# Altium footprint library LimeMicroAltiumLib.PcbLib: 876 footprints (part 7 of 57)
Each footprint in its own frame and in the unit in brackets; x right, y up, seen from the top. Pads: shape width x height; smd on the part's side, far side on the other; paste and mask are expansions set on the pad; w line width, h text height; cw(c..) or ccw(c..) is an arc to the next point about the centre after c.
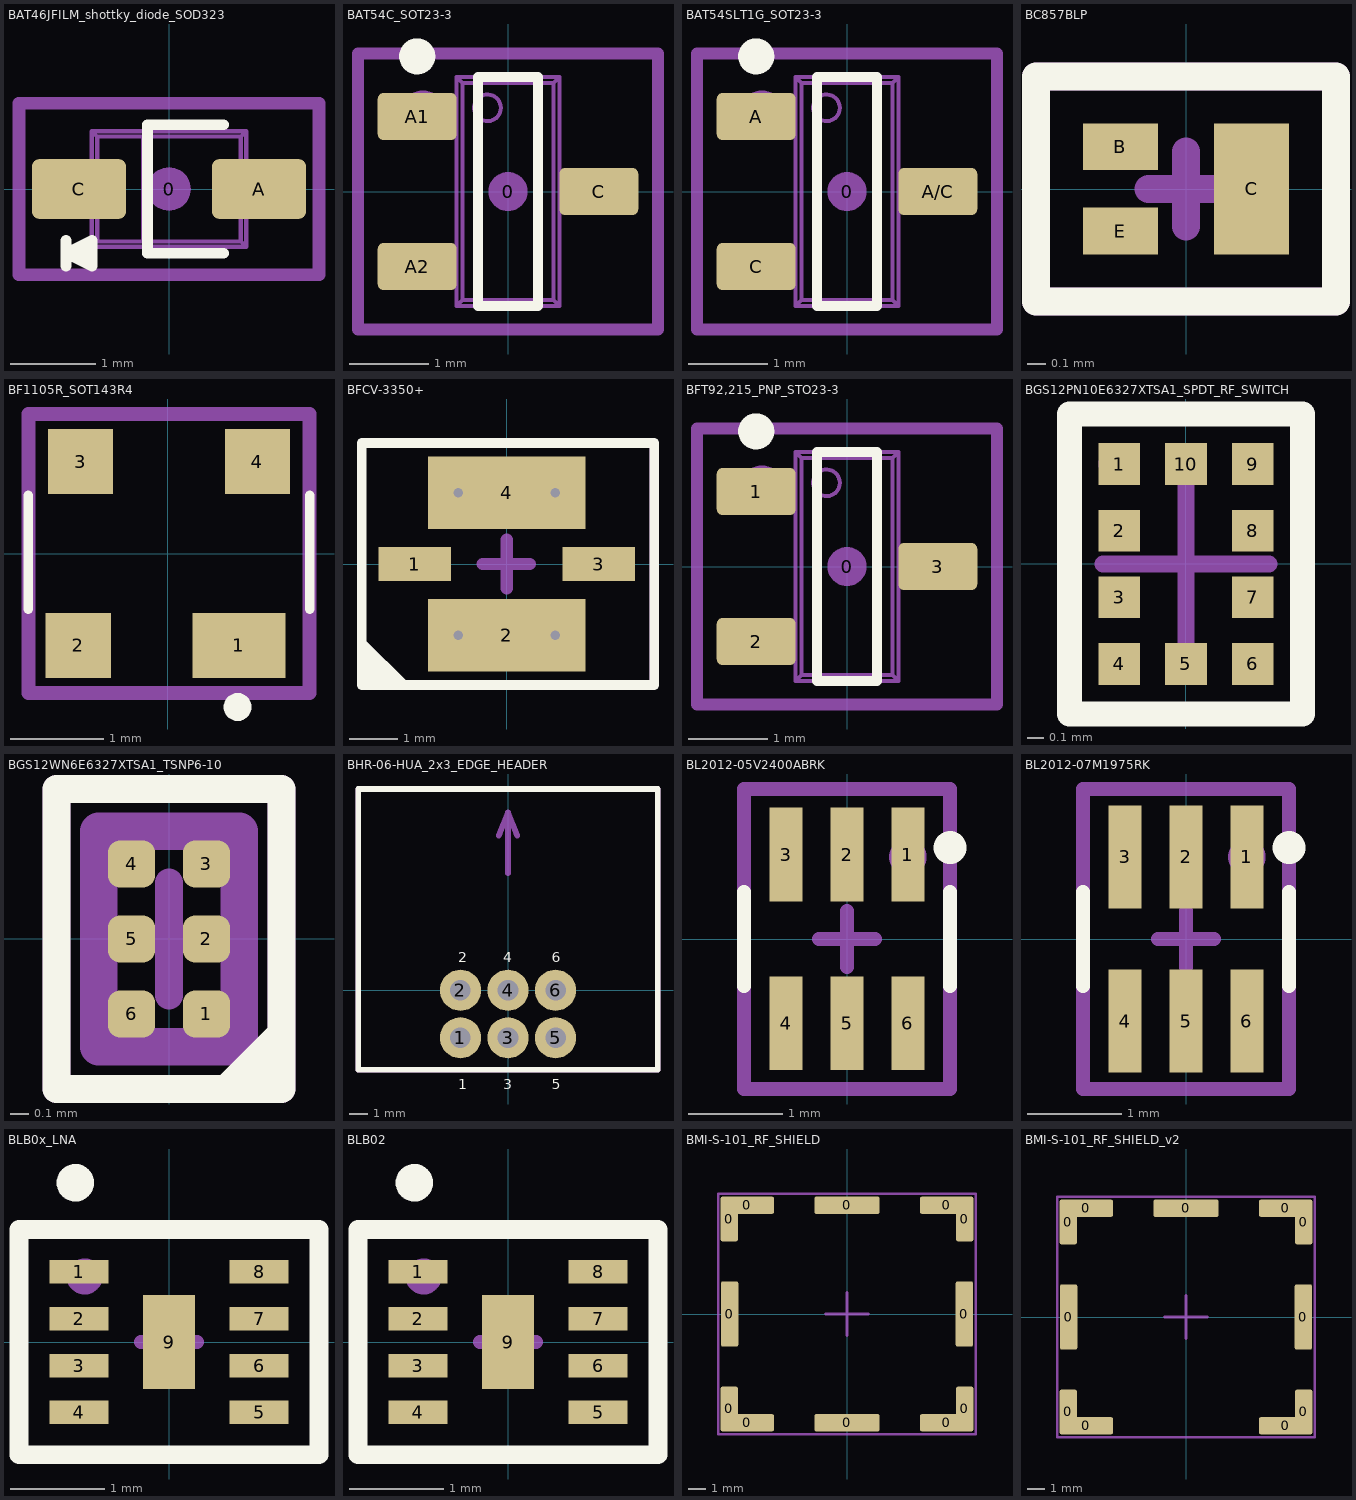
[diagram p6: the footprints below, top view; thin cyan lines are the x and y axes]

## BAT46JFILM_shottky_diode_SOD323 [mm] "SOD-323; 2 Leads; Body 1.8 x 1.35 mm, (LxW)"
height 1.15
pads (3):
  round 0.508 on Mech15: 0(0,0)
  rrect25% 1.1x0.7 smd: A(1.05,0) C(-1.05,0)
Top Overlay:
  lines w0.127: -1.2,-0.9 -1.2,-0.6 ; -0.9,-0.75 -1.2,-0.75 ; 0.635,-0.75 -0.25,-0.75 -0.25,0.75 0.635,0.75 ; -1.2,-0.75 -0.9,-0.9 -0.9,-0.6 -1.2,-0.75
Mechanical 13:
  lines w0.05: -1.157,-0.2 -1.157,0.2 ; -1.11,-0.2 -1.11,0.2 ; -0.91,-0.2 -0.91,0.2 ; -0.9,-0.2 -0.9,-0.675 ; -0.9,0.2 -0.9,0.675 ; 0.9,-0.2 0.9,-0.675 ; 0.9,0.2 0.9,0.675 ; 0.91,-0.2 0.91,0.2 ; 1.11,-0.2 1.11,0.2 ; 1.157,-0.2 1.157,0.2 ; -0.9,-0.675 -0.838,-0.613 ; -0.9,-0.675 0.9,-0.675 ; -0.9,0.675 0.9,0.675 ; -0.9,0.675 -0.838,0.613 ; -0.838,-0.613 -0.838,0.613 ; -0.838,-0.613 -0.3,-0.613 ; -0.838,0.613 -0.3,0.613 ; -0.3,-0.613 -0.3,0.613 ; -0.3,-0.613 0.838,-0.613 ; -0.3,0.613 0.838,0.613 ; 0.838,-0.613 0.838,0.613 ; 0.838,-0.613 0.9,-0.675 ; 0.838,0.613 0.9,0.675 ; -1.3,-0.2 -1.3,0.2 -0.879,0.2 -0.879,-0.2 -1.3,-0.2 ; 0.879,-0.2 1.3,-0.2 1.3,0.2 0.879,0.2 0.879,-0.2
Mechanical 15:
  lines w0.15: -1.75,-1 -1.75,1 1.75,1 1.75,-1 -1.75,-1
  text ".Designator" at 0,0 h0.55
  text "A" at 1.05,-0.25 h0.55
  text "C" at -1.425,-0.25 h0.55
3D body "SOD323.STEP": height 1.1, standoff 0, extent -1.3,-0.675 1.3,0.675

## BAT54C_SOT23-3 [mm] "SOT23, 3 pin"
height 1.003
pads (4):
  round 0.5 on Mech15: 0(0,0)
  rrect25% 1x0.6 smd: A1(-1.15,0.95) A2(-1.15,-0.95) C(1.15,0)
Top Overlay:
  circle w0.254: c-1.15,1.712 r0.102
  lines w0.127: -0.381,-1.45 -0.381,1.45 0.381,1.45 0.381,-1.45 -0.381,-1.45
Mechanical 13:
  circle w0.05: c-0.26,1.06 r0.169
  lines w0.05: -1.19,-1.19 -1.19,-0.71 ; -1.19,0.71 -1.19,1.19 ; -1.099,-1.19 -1.099,-0.71 ; -1.099,0.71 -1.099,1.19 ; -1.074,-1.19 -1.074,-0.71 ; -1.074,0.71 -1.074,1.19 ; -0.825,-1.19 -0.825,-0.71 ; -0.825,0.71 -0.825,1.19 ; -0.65,-1.19 -1.4,-1.19 -1.4,-0.71 -0.65,-0.71 ; -0.65,0.71 -1.4,0.71 -1.4,1.19 -0.65,1.19 ; 0.65,-0.24 1.4,-0.24 1.4,0.24 0.65,0.24 ; 0.825,-0.24 0.825,0.24 ; 1.074,-0.24 1.074,0.24 ; 1.099,-0.24 1.099,0.24 ; 1.19,-0.24 1.19,0.24 ; -0.65,-1.45 0.65,-1.45 ; -0.65,-1.45 -0.65,1.45 ; -0.65,-1.45 -0.576,-1.376 ; -0.65,1.45 -0.576,1.376 ; -0.65,1.45 0.65,1.45 ; -0.576,-1.376 0.576,-1.376 ; -0.576,-1.376 -0.576,1.376 ; -0.576,1.376 0.576,1.376 ; 0.576,-1.376 0.65,-1.45 ; 0.576,-1.376 0.576,1.376 ; 0.576,1.376 0.65,1.45 ; 0.65,-1.45 0.65,1.45
Mechanical 15:
  circle w0.35: c-1.073,0.975 r0.127
  lines w0.15: -1.9,-1.75 -1.9,1.75 1.9,1.75 1.9,-1.75 -1.9,-1.75
  text ".Designator" at 0,0 h0.55
3D body "SOT23-3.STEP": height 1.29, standoff -0.01, extent -1.4,-1.45 1.4,1.45

## BAT54SLT1G_SOT23-3 [mm] "SOT23, 3 pin"
height 1.003
pads (4):
  round 0.5 on Mech15: 0(0,0)
  rrect25% 1x0.6 smd: A(-1.15,0.95) A/C(1.15,0) C(-1.15,-0.95)
Top Overlay:
  circle w0.254: c-1.15,1.712 r0.102
  lines w0.127: -0.381,-1.45 -0.381,1.45 0.381,1.45 0.381,-1.45 -0.381,-1.45
Mechanical 13:
  circle w0.05: c-0.26,1.06 r0.169
  lines w0.05: -1.19,-1.19 -1.19,-0.71 ; -1.19,0.71 -1.19,1.19 ; -1.099,-1.19 -1.099,-0.71 ; -1.099,0.71 -1.099,1.19 ; -1.074,-1.19 -1.074,-0.71 ; -1.074,0.71 -1.074,1.19 ; -0.825,-1.19 -0.825,-0.71 ; -0.825,0.71 -0.825,1.19 ; -0.65,-1.19 -1.4,-1.19 -1.4,-0.71 -0.65,-0.71 ; -0.65,0.71 -1.4,0.71 -1.4,1.19 -0.65,1.19 ; 0.65,-0.24 1.4,-0.24 1.4,0.24 0.65,0.24 ; 0.825,-0.24 0.825,0.24 ; 1.074,-0.24 1.074,0.24 ; 1.099,-0.24 1.099,0.24 ; 1.19,-0.24 1.19,0.24 ; -0.65,-1.45 0.65,-1.45 ; -0.65,-1.45 -0.65,1.45 ; -0.65,-1.45 -0.576,-1.376 ; -0.65,1.45 -0.576,1.376 ; -0.65,1.45 0.65,1.45 ; -0.576,-1.376 0.576,-1.376 ; -0.576,-1.376 -0.576,1.376 ; -0.576,1.376 0.576,1.376 ; 0.576,-1.376 0.65,-1.45 ; 0.576,-1.376 0.576,1.376 ; 0.576,1.376 0.65,1.45 ; 0.65,-1.45 0.65,1.45
Mechanical 15:
  circle w0.35: c-1.073,0.975 r0.127
  lines w0.15: -1.9,-1.75 -1.9,1.75 1.9,1.75 1.9,-1.75 -1.9,-1.75
  text ".Designator" at 0,0 h0.55
3D body "SOT23-3.STEP": height 1.29, standoff -0.01, extent -1.4,-1.45 1.4,1.45

## BC857BLP [mm]
pads (3):
  rect 0.4x0.25 smd mask+0.05: B(-0.35,0.225) E(-0.35,-0.225)
  rect 0.4x0.7 smd mask+0.05: C(0.35,0)
Top Overlay:
  lines w0.15: -0.8,-0.6 0.8,-0.6 0.8,0.6 -0.8,0.6 -0.8,-0.6
Mechanical 15:
  lines w0.15: -0.2,0 0.2,0 ; 0,-0.2 0,0.2 ; -0.8,-0.6 -0.8,0.6 0.8,0.6 0.8,-0.6 -0.8,-0.6
  text ".Designator" at 0,0 h0.55
3D body: height 0.5, standoff 0, extent -0.5,-0.3 0.5,0.3

## BF1105R_SOT143R4 [mm] "RF MOSFET Transistors Trans MOSFET N-CH 7V 0.03A 4pin(3+Tab). SOT-143R-4 package"
pads (4):
  rect 1x0.7 smd: 1(0.763,-0.987)
  rect 0.7x0.7 smd: 2(-0.962,-0.987) 3(-0.937,0.988) 4(0.963,0.988)
Top Overlay:
  circle w0.15: c0.75,-1.65 r0.075
  lines w0.1: -1.5,-0.6 -1.5,0.625 ; 1.525,-0.6 1.525,0.625
Mechanical 15:
  circle w0.15: c0.75,-0.975 r0.056
  lines w0.15: -1.5,-1.5 -1.5,1.5 1.525,1.5 1.525,-1.5 -1.5,-1.5
  text ".Designator" at 0,0 h0.55
3D body "User Library-SOT143R.STEP": height 0.95, standoff 0.02, extent -1.438,-1.262 1.463,1.238

## BFCV-3350+ [mm]
pads (4):
  rect 1.5x0.7 smd: 1(-1.9,0) 3(1.9,0)
  rect 3.25x1.5 smd: 2(0,-1.475) 4(0,1.475)
via -1,1.475 diameter 0.5 hole 0.2
via 1,1.475 diameter 0.5 hole 0.2
via 1,-1.475 diameter 0.5 hole 0.2
via -1,-1.475 diameter 0.5 hole 0.2
Top Overlay:
  region: -2,-2.5 -3,-1.5 -3,-2.5
  lines w0.2: -3,-2.5 3.05,-2.5 3.05,2.5 -3,2.5 -3,-1.8 -3,-2.5
Mechanical 15:
  lines w0.1: -3,-2.5 -3,2.5 3,2.5 3,-2.5 -3,-2.5
  lines w0.254: -0.5,0 0,0 ; 0,-0.5 0,0 ; 0,0.5 0,0 ; 0.475,0 0,0
  text "1" at -2,0 h0.55
  text ".Designator" at 0,0 h0.55
3D body: height 1, standoff 0, extent -1.6,-1.25 1.6,1.25
3D body: height 1.01, standoff 0, extent -0.948,-0.2 -0.55,0.2

## BFT92,215_PNP_STO23-3 [mm]
pads (4):
  round 0.5 on Mech15: 0(0,0)
  rrect25% 1x0.6 smd: 1(-1.15,0.95) 2(-1.15,-0.95) 3(1.15,0)
Top Overlay:
  circle w0.254: c-1.15,1.712 r0.102
  lines w0.127: -0.381,-1.45 -0.381,1.45 0.381,1.45 0.381,-1.45 -0.381,-1.45
Mechanical 13:
  circle w0.05: c-0.26,1.06 r0.169
  lines w0.05: -1.19,-1.19 -1.19,-0.71 ; -1.19,0.71 -1.19,1.19 ; -1.099,-1.19 -1.099,-0.71 ; -1.099,0.71 -1.099,1.19 ; -1.074,-1.19 -1.074,-0.71 ; -1.074,0.71 -1.074,1.19 ; -0.825,-1.19 -0.825,-0.71 ; -0.825,0.71 -0.825,1.19 ; -0.65,-1.19 -1.4,-1.19 -1.4,-0.71 -0.65,-0.71 ; -0.65,0.71 -1.4,0.71 -1.4,1.19 -0.65,1.19 ; 0.65,-0.24 1.4,-0.24 1.4,0.24 0.65,0.24 ; 0.825,-0.24 0.825,0.24 ; 1.074,-0.24 1.074,0.24 ; 1.099,-0.24 1.099,0.24 ; 1.19,-0.24 1.19,0.24 ; -0.65,-1.45 0.65,-1.45 ; -0.65,-1.45 -0.65,1.45 ; -0.65,-1.45 -0.576,-1.376 ; -0.65,1.45 -0.576,1.376 ; -0.65,1.45 0.65,1.45 ; -0.576,-1.376 0.576,-1.376 ; -0.576,-1.376 -0.576,1.376 ; -0.576,1.376 0.576,1.376 ; 0.576,-1.376 0.65,-1.45 ; 0.576,-1.376 0.576,1.376 ; 0.576,1.376 0.65,1.45 ; 0.65,-1.45 0.65,1.45
Mechanical 15:
  circle w0.35: c-1.073,0.975 r0.127
  lines w0.15: -1.9,-1.75 -1.9,1.75 1.9,1.75 1.9,-1.75 -1.9,-1.75
  text ".Designator" at 0,0 h0.55
3D body "SOT23-3.STEP": height 1.29, standoff -0.01, extent -1.4,-1.45 1.4,1.45

## BGS12PN10E6327XTSA1_SPDT_RF_SWITCH [mm]
pads (10):
  rect 0.25x0.25 smd mask+0.02: 1(-0.4,0.6) 2(-0.4,0.2) 3(-0.4,-0.2) 4(-0.4,-0.6) 5(0,-0.6) 6(0.4,-0.6) 7(0.4,-0.2) 8(0.4,0.2) 9(0.4,0.6) 10(0,0.6)
Top Overlay:
  lines w0.15: -0.7,-0.9 0.7,-0.9 0.7,0.9 -0.7,0.9 -0.7,-0.9
Mechanical 15:
  circle w0.15: c-0.4,0.6 r0.05
  lines w0.1: -0.5,0 0.5,0 ; 0,-0.5 0,0.5 ; -0.7,-0.9 0.7,-0.9 0.7,0.9 -0.7,0.9 -0.7,-0.9
  text ".Designator" at 0,0 h0.55
3D body "PG-TSNP-10-1_C66065-A0004-C096-02-0004.stp": height 0.4, standoff 0, extent -0.55,-0.75 0.55,0.75

## BGS12WN6E6327XTSA1_TSNP6-10 [mm]
pads (6):
  rrect50% 0.25x0.25 smd paste+0 mask+0.02: 1(0.2,-0.4) 2(0.2,0) 3(0.2,0.4) 4(-0.2,0.4) 5(-0.2,0) 6(-0.2,-0.4)
Top Overlay:
  region: 0.2,-0.8 0.6,-0.4 0.6,-0.8
  lines w0.15: -0.6,-0.8 -0.6,0.8 0.6,0.8 0.6,-0.8 -0.6,-0.8
Mechanical 13:
  lines w0.2: -0.375,-0.575 -0.375,0.575 0.375,0.575 0.375,-0.575 -0.375,-0.575
Mechanical 15:
  circle w0.2: c0.3,-0.5 r0.071
  lines w0.15: -0.3,0 0,0 ; 0,-0.3 0,0 ; 0,0.3 0,0 ; 0.3,0 0,0 ; -0.6,-0.8 -0.6,0.8 0.6,0.8 0.6,-0.8 -0.6,-0.8
  text ".Designator" at 0,0 h0.55
3D body "IC_Infineon_BGS12WN6E6327XTSA1_eec.STEP": height 0.25, standoff 0, extent -0.475,-0.675 0.475,0.675

## BHR-06-HUA_2x3_EDGE_HEADER [mm]
pads (6):
  round 2.2 hole 1.1 mask+0.05: 1(-2.54,-2.54) 2(-2.54,0) 3(0,-2.54) 4(0,0) 5(2.54,-2.54) 6(2.54,0)
Top Overlay:
  lines w0.3: -8,-4.25 -8,10.75 8,10.75 8,-4.25 -8,-4.25
  text "1" at -2.65,-5.275 h0.55
  text "3" at -0.25,-5.275 h0.55
  text "5" at 2.35,-5.275 h0.55
  text "6" at 2.35,1.5 h0.55
  text "4" at -0.25,1.5 h0.55
  text "2" at -2.65,1.5 h0.55
Mechanical 15:
  lines w0.3: -0.5,8.25 0,9.5 ; 0,6.25 0,9.5 ; 0.5,8.25 0,9.5 ; -8,-4.25 8,-4.25 8,10.75 -8,10.75 -8,-4.25
  text ".Designator" at 0,3.9 h0.55
  text "4" at -0.25,-0.2 h0.55
  text "6" at 2.35,-0.2 h0.55
  text "2" at -2.65,-0.2 h0.55
  text "3" at -0.15,-2.7 h0.55
  text "5" at 2.45,-2.7 h0.55
  text "1" at -2.55,-2.7 h0.55
  text "Board edge" at -2.25,5.5 h0.55
3D body "61200621721_Download_STP_61200621721_rev1.stp": height 8.93, standoff -2.9, extent -7.64,-2.865 7.64,10.685

## BL2012-05V2400ABRK [mm]
pads (6):
  rect 0.35x1 smd mask+0.05: 1(0.65,0.9) 2(0,0.9) 3(-0.65,0.9) 4(-0.65,-0.9) 5(0,-0.9) 6(0.65,-0.9)
Top Overlay:
  circle w0.3: c1.1,0.975 r0.025
  lines w0.15: -1.1,-0.5 -1.1,0.5 ; 1.1,-0.5 1.1,0.5
Mechanical 15:
  circle w0.3: c0.65,0.875 r0.05
  lines w0.15: -0.3,0 0.3,0 ; 0,-0.3 0,0.3 ; -1.1,-1.6 -1.1,1.6 1.1,1.6 1.1,-1.6 -1.1,-1.6
  text ".Designator" at 0,0 h0.55
3D body: height 0.95, standoff 0, extent -1,-1 1,1
3D body: height 0.96, standoff 0, extent 0.5,0.725 0.8,1.037
3D body: height 0.96, standoff 0, extent 0.4,-0.2 0.8,0.2
3D body: height 0.96, standoff 0, extent -0.15,0.725 0.15,1.037
3D body: height 0.96, standoff 0, extent -0.8,0.725 -0.5,1.037
3D body: height 0.96, standoff 0, extent -0.8,-1.037 -0.5,-0.725
3D body: height 0.96, standoff 0, extent -0.15,-1.037 0.15,-0.725
3D body: height 0.96, standoff 0, extent 0.5,-1.037 0.8,-0.725

## BL2012-07M1975RK [mm]
pads (6):
  rect 0.35x1.1 smd mask+0.05: 1(0.65,0.875) 2(0,0.875) 3(-0.65,0.875) 4(-0.65,-0.875) 5(0,-0.875) 6(0.65,-0.875)
Top Overlay:
  circle w0.3: c1.1,0.975 r0.025
  lines w0.15: -1.1,-0.5 -1.1,0.5 ; 1.1,-0.5 1.1,0.5
Mechanical 15:
  circle w0.3: c0.65,0.875 r0.05
  lines w0.15: -0.3,0 0.3,0 ; 0,-0.3 0,0.3 ; -1.1,-1.6 1.1,-1.6 1.1,1.6 -1.1,1.6 -1.1,-1.6
  text ".Designator" at 0,0 h0.55
3D body: height 0.96, standoff 0, extent 0.338,-0.125 0.613,0.125
3D body: height 0.96, standoff 0, extent 0.5,0.512 0.8,0.637
3D body: height 0.96, standoff 0, extent -0.8,0.513 -0.5,0.638
3D body: height 0.96, standoff 0, extent -0.15,0.512 0.15,0.637
3D body: height 0.96, standoff 0, extent 0.5,-0.637 0.8,-0.512
3D body: height 0.96, standoff 0, extent -0.15,-0.637 0.15,-0.512
3D body: height 0.96, standoff 0, extent -0.8,-0.637 -0.5,-0.512
3D body: height 0.95, standoff 0, extent -1,-0.625 1,0.625

## BLB0x_LNA [mm] "BLB01 and BLB02 footprint"
pads (9):
  rect 0.625x0.25 smd mask+0.05: 1(-0.96,0.75) 2(-0.96,0.25) 3(-0.96,-0.25) 4(-0.96,-0.75) 5(0.96,-0.75) 6(0.96,-0.25) 7(0.96,0.25) 8(0.96,0.75)
  rect 0.56x1 smd mask+0.05: 9(0,0)
Top Overlay:
  circle w0.2: c-1,1.7 r0.1
  lines w0.2: -1.6,-1.2 1.6,-1.2 1.6,1.2 -1.6,1.2 -1.6,-1.2
Mechanical 15:
  circle w0.254: c-0.9,0.7 r0.064
  lines w0.15: -0.3,0 0.3,0 ; 0,-0.3 0,0.3 ; -1.6,-1.2 -1.6,1.2 1.6,1.2 1.6,-1.2 -1.6,-1.2
  text ".Designator" at 0,0 h0.55
3D body: height 0.6, standoff 0, extent -1.1,-1.1 1.1,1.1
3D body: height 0.61, standoff 0, extent -0.949,0.65 -0.65,0.95

## BLB02 [mm]
pads (9):
  rect 0.625x0.25 smd mask+0.05: 1(-0.96,0.75) 2(-0.96,0.25) 3(-0.96,-0.25) 4(-0.96,-0.75) 5(0.96,-0.75) 6(0.96,-0.25) 7(0.96,0.25) 8(0.96,0.75)
  rect 0.56x1 smd mask+0.05: 9(0,0)
Top Overlay:
  circle w0.2: c-1,1.7 r0.1
  lines w0.2: -1.6,-1.2 1.6,-1.2 1.6,1.2 -1.6,1.2 -1.6,-1.2
Mechanical 15:
  circle w0.254: c-0.9,0.7 r0.064
  lines w0.15: -0.3,0 0.3,0 ; 0,-0.3 0,0.3 ; -1.6,-1.2 -1.6,1.2 1.6,1.2 1.6,-1.2 -1.6,-1.2
  text ".Designator" at 0,0 h0.55
3D body: height 0.6, standoff 0, extent -1.1,-1.1 1.1,1.1
3D body: height 0.61, standoff 0, extent -0.949,0.65 -0.65,0.95

## BMI-S-101_RF_SHIELD [mm] "Full footprint"
pads (12):
  rrect20% 1x2.6 smd mask+0.05: 0(-6.85,-5.525) 0(-6.85,5.525) 0(6.85,-5.525) 0(6.85,5.525)
  rrect20% 1x3.8 smd mask+0.05: 0(-6.825,0) 0(6.825,0)
  rrect20% 3.1x1 smd mask+0.05: 0(-5.8,-6.325) 0(-5.8,6.325) 0(5.8,-6.325) 0(5.8,6.325)
  rrect20% 3.8x1 smd mask+0.05: 0(0,-6.325) 0(0,6.325)
Mechanical 15:
  lines w0.15: -1.25,0 0,0 ; 0,-1.25 0,0 ; 0,1.25 0,0 ; 1.25,0 0,0 ; -7.5,-7 7.5,-7 7.5,7 -7.5,7 -7.5,-7
  text ".Designator" at 0,0 h0.55
3D body "bmi-s-101-stp-file.STP": height 2.57, standoff 0.03, extent -6.83,-6.35 6.83,6.35

## BMI-S-101_RF_SHIELD_v2 [mm] "Full footprint"
pads (11):
  rrect20% 1x2.6 smd mask+0.05: 0(-6.85,-5.525) 0(-6.85,5.525) 0(6.85,-5.525) 0(6.85,5.525)
  rrect20% 1x3.8 smd mask+0.05: 0(-6.825,0) 0(6.825,0)
  rrect20% 3.1x1 smd mask+0.05: 0(-5.8,-6.325) 0(-5.8,6.325) 0(5.8,-6.325) 0(5.8,6.325)
  rrect20% 3.8x1 smd mask+0.05: 0(0,6.325)
Mechanical 15:
  lines w0.15: -1.25,0 0,0 ; 0,-1.25 0,0 ; 0,1.25 0,0 ; 1.25,0 0,0 ; -7.5,-7 7.5,-7 7.5,7 -7.5,7 -7.5,-7
  text ".Designator" at 0,0 h0.55
3D body "bmi-s-101-stp-file.STP": height 2.57, standoff 0.03, extent -6.83,-6.35 6.83,6.35